# Altium footprint library Inductors.PcbLib: 4 footprints
Each footprint in its own frame and in the unit in brackets; x right, y up, seen from the top. Pads: shape width x height; smd on the part's side, far side on the other; paste and mask are expansions set on the pad; w line width, h text height; cw(c..) or ccw(c..) is an arc to the next point about the centre after c.
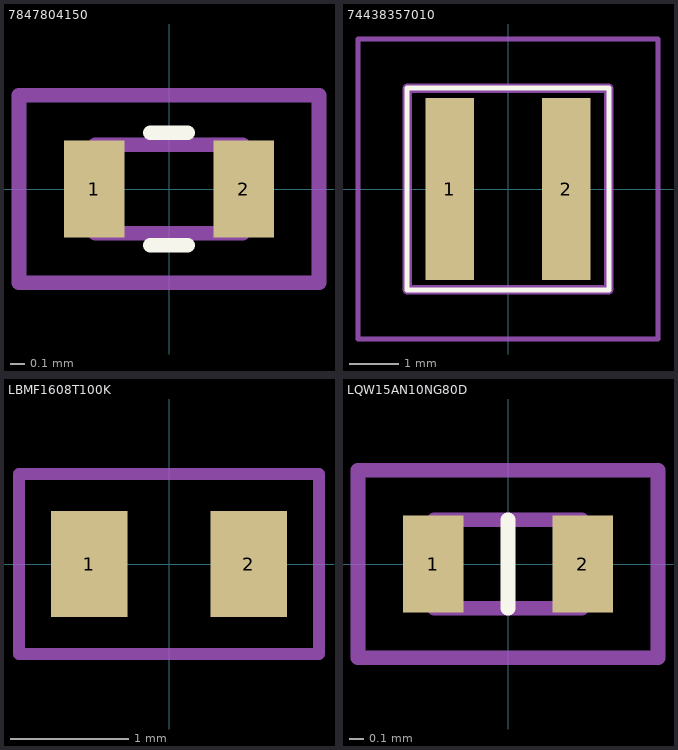
[diagram p0: the footprints below, top view; thin cyan lines are the x and y axes]

## 7847804150 [mm] "Wuerth 0402 RF Inductors - SMD WE-MCI 15nH 0.46Ohms Q-Factor=8 AEC-Q200"
pads (2):
  rect 0.41x0.66 smd mask+0.05: 1(-0.505,0) 2(0.505,0)
Top Overlay:
  lines w0.1: -0.127,-0.381 0,-0.381 0.127,-0.381 ; -0.127,0.381 0,0.381 0.127,0.381
Mechanical 13:
  lines w0.1: -0.5,-0.3 0.5,-0.3 0.5,0.3 -0.5,0.3 -0.5,-0.3
Mechanical 15:
  lines w0.1: -1.016,-0.635 1.016,-0.635 1.016,0.635 -1.016,0.635 -1.016,-0.635
3D body "Wuerth-0402-7847804150 v2.step": height 0.5, standoff 0, extent -0.5,-0.25 0.5,0.25

## 74438357010 [mm] "Power Inductors - SMD WE-MAPI 1uH 7.4A DCR=13.5mOhms AEC-Q200"
pads (2):
  rect 0.98x3.7 smd: 1(-1.185,0) 2(1.185,0)
Top Overlay:
  lines w0.1: -2.05,-2.05 -2.05,2.05 2.05,2.05 2.05,-2.05 -2.05,-2.05
Mechanical 13:
  lines w0.2: -2.05,-2.05 -2.05,2.05 2.05,2.05 2.05,-2.05 -2.05,-2.05
Mechanical 15:
  lines w0.1: -3.05,-3.05 -3.05,3.05 3.05,3.05 3.05,-3.05 -3.05,-3.05
3D body "74438357010.stp": height 3.1, standoff 0, extent -2.05,-2.05 2.05,2.05

## LBMF1608T100K [mm] "TAIYO YUDEN 0603 footprint for power inductors"
pads (2):
  rect 0.65x0.9 smd mask+0.05: 1(-0.675,0) 2(0.675,0)
Mechanical 15:
  lines w0.1: -1.27,-0.762 1.27,-0.762 1.27,0.762 -1.27,0.762 -1.27,-0.762
3D body "LBMF1608T100K v7.step": height 0.8, standoff 0, extent -0.8,-0.4 0.8,0.4

## LQW15AN10NG80D [mm]
pads (2):
  rect 0.41x0.66 smd mask+0.05: 1(-0.505,0) 2(0.505,0)
Top Overlay:
  lines w0.1: 0,-0.3 0,0.3
Mechanical 13:
  lines w0.1: -0.5,-0.3 0.5,-0.3 0.5,0.3 -0.5,0.3 -0.5,-0.3
Mechanical 15:
  lines w0.1: -1.016,-0.635 1.016,-0.635 1.016,0.635 -1.016,0.635 -1.016,-0.635
3D body "LQW15AN2N2G80D.stp": height 0.6, standoff 0, extent -0.5,-0.25 0.5,0.25